# Altium footprint library FootPrintLib_12.PcbLib: 319 footprints (part 17 of 20)
Each footprint in its own frame and in the unit in brackets; x right, y up, seen from the top. Pads: shape width x height; smd on the part's side, far side on the other; paste and mask are expansions set on the pad; w line width, h text height; cw(c..) or ccw(c..) is an arc to the next point about the centre after c.
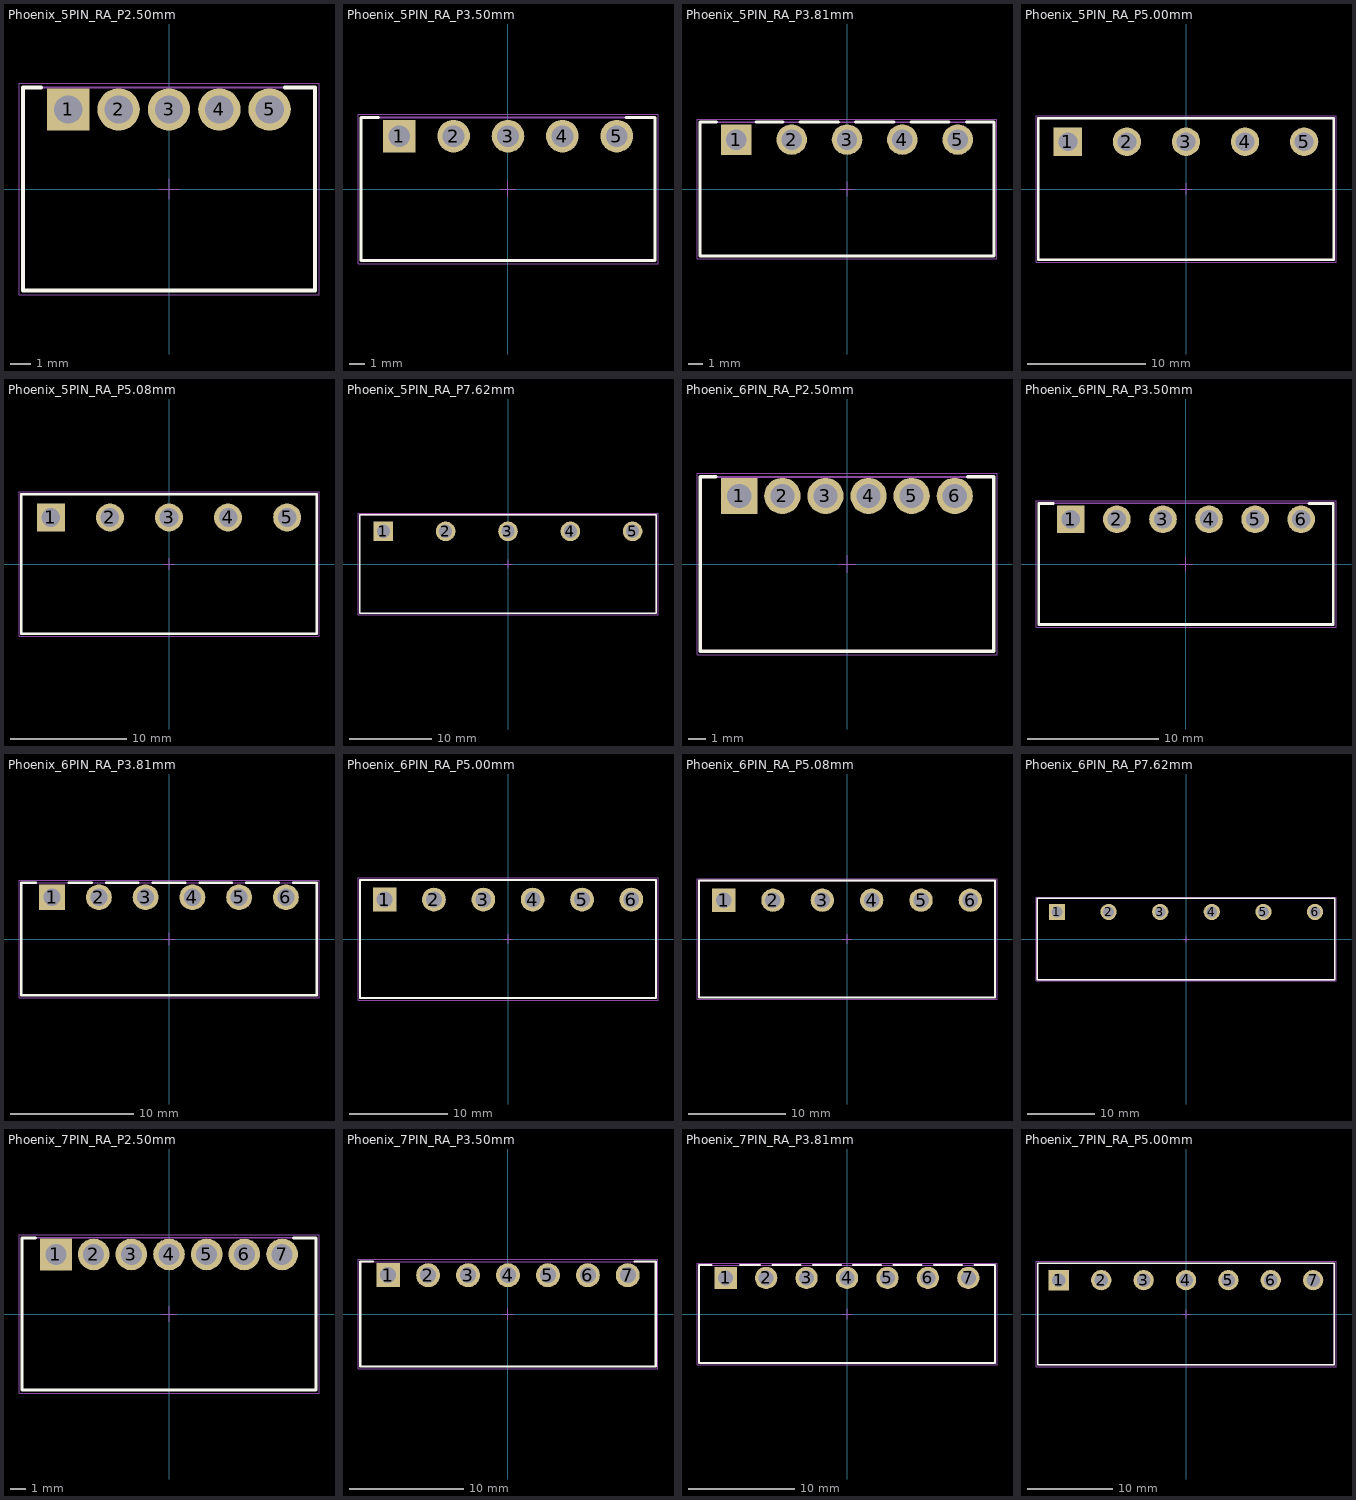
[diagram p16: the footprints below, top view; thin cyan lines are the x and y axes]

## Phoenix_5PIN_RA_P2.50mm [mm] "Phoenix 5 Pin; Pitch 2.50mm;"
height 8.1
pads (5):
  rect 2.1x2.1 hole 1.4: 1(-5,3.95)
  round 2.1 hole 1.4: 2(-2.5,3.95) 3(0,3.95) 4(2.5,3.95) 5(5,3.95)
Top Overlay:
  lines w0.2: -6.35,5.05 -7.25,5.05 -7.25,-5.05 7.25,-5.05 7.25,5.05 5.75,5.05
Mechanical 13:
  lines w0.1: -7.25,-5.05 7.25,-5.05 7.25,5.05 -7.25,5.05 -7.25,-5.05
Mechanical 15:
  lines w0.05: -0.5,0 0.5,0 ; 0,-0.5 0,0.5 ; -7.45,-5.25 7.45,-5.25 7.45,5.25 -7.45,5.25 -7.45,-5.25
3D body "691382010005.stp": height 8.15, standoff -3.45, extent -7.25,-5.05 7.25,5.05

## Phoenix_5PIN_RA_P3.50mm [mm] "Phoenix 5 Pin; Pitch 3.50mm;"
height 7
pads (5):
  rect 2.1x2.1 hole 1.4: 1(-7,3.4)
  round 2.1 hole 1.4: 2(-3.5,3.4) 3(0,3.4) 4(3.5,3.4) 5(7,3.4)
Top Overlay:
  lines w0.2: -8.35,4.6 -9.45,4.6 -9.45,-4.6 9.45,-4.6 9.45,4.6 7.6,4.6
Mechanical 13:
  lines w0.1: -9.45,-4.6 9.45,-4.6 9.45,4.6 -9.45,4.6 -9.45,-4.6
Mechanical 15:
  lines w0.05: -0.5,0 0.5,0 ; 0,-0.5 0,0.5 ; -9.65,-4.8 9.65,-4.8 9.65,4.8 -9.65,4.8 -9.65,-4.8
3D body "691322110005.stp": height 7.3, standoff -3.4, extent -9.45,-4.6 9.45,4.6

## Phoenix_5PIN_RA_P3.81mm [mm] "Phoenix 5 Pin; Pitch 3.81mm;"
height 7
pads (5):
  rect 2.1x2.1 hole 1.4: 1(-7.62,3.4)
  round 2.1 hole 1.4: 2(-3.81,3.4) 3(0,3.4) 4(3.81,3.4) 5(7.62,3.4)
Top Overlay:
  lines w0.2: -8.97,4.6 -10.12,4.6 -10.12,-4.6 10.12,-4.6 10.12,4.6 8.21,4.6 ; -6.27,4.6 -4.4,4.6 ; -3.22,4.6 -0.59,4.6 ; 0.59,4.6 3.22,4.6 ; 4.4,4.6 7.03,4.6
Mechanical 13:
  lines w0.1: -10.12,-4.6 10.12,-4.6 10.12,4.6 -10.12,4.6 -10.12,-4.6
Mechanical 15:
  lines w0.05: -0.5,0 0.5,0 ; 0,-0.5 0,0.5 ; -10.32,-4.8 10.32,-4.8 10.32,4.8 -10.32,4.8 -10.32,-4.8
3D body "691322310005.stp": height 7.25, standoff -3.45, extent -10.12,-4.6 10.12,4.6

## Phoenix_5PIN_RA_P5.00mm [mm] "Phoenix 5 Pin; Pitch 5.08mm;"
height 8.5
pads (5):
  rect 2.4x2.4 hole 1.6: 1(-10,4)
  round 2.4 hole 1.6: 2(-5,4) 3(0,4) 4(5,4) 5(10,4)
Top Overlay:
  lines w0.2: -12.5,-6 12.5,-6 12.5,6 -12.5,6 -12.5,-6
Mechanical 13:
  lines w0.1: -12.5,-6 -12.5,6 12.5,6 12.5,-6 -12.5,-6
Mechanical 15:
  lines w0.05: -0.5,0 0.5,0 ; 0,-0.5 0,0.5 ; -12.7,-6.2 12.7,-6.2 12.7,6.2 -12.7,6.2 -12.7,-6.2
3D body "691312710005.stp": height 8.55, standoff -3.45, extent -12.5,-6 12.5,6

## Phoenix_5PIN_RA_P5.08mm [mm] "Phoenix 5 Pin; Pitch 5.08mm; Body 2540X1200"
height 8.5
pads (5):
  rect 2.4x2.4 hole 1.6: 1(-10.16,4)
  round 2.4 hole 1.6: 2(-5.08,4) 3(0,4) 4(5.08,4) 5(10.16,4)
Top Overlay:
  lines w0.2: -12.7,-6 12.7,-6 12.7,6 -12.7,6 -12.7,-6
Mechanical 13:
  lines w0.1: -12.7,-6 -12.7,6 12.7,6 12.7,-6 -12.7,-6
Mechanical 15:
  lines w0.05: -0.5,0 0.5,0 ; 0,-0.5 0,0.5 ; -12.9,-6.2 12.9,-6.2 12.9,6.2 -12.9,6.2 -12.9,-6.2
3D body "691312510005.stp": height 8.55, standoff -3.45, extent -12.7,-6 12.7,6

## Phoenix_5PIN_RA_P7.62mm [mm] "Phoenix 5 Pin; Pitch 7.62mm;"
height 8.5
pads (5):
  rect 2.4x2.4 hole 1.6: 1(-15.24,4)
  round 2.4 hole 1.6: 2(-7.62,4) 3(0,4) 4(7.62,4) 5(15.24,4)
Top Overlay:
  lines w0.2: -18.14,-6 18.14,-6 18.14,6 -18.14,6 -18.14,-6
Mechanical 13:
  lines w0.1: -18.14,-6 -18.14,6 18.14,6 18.14,-6 -18.14,-6
Mechanical 15:
  lines w0.05: -0.5,0 0.5,0 ; 0,-0.5 0,0.5 ; -18.34,-6.2 -18.34,6.2 18.34,6.2 18.34,-6.2 -18.34,-6.2
3D body "691312410005.stp": height 8.55, standoff -3.95, extent -18.14,-6 18.14,6

## Phoenix_6PIN_RA_P2.50mm [mm] "Phoenix 6 Pin; Pitch 2.50mm;"
height 8.1
pads (6):
  rect 2.1x2.1 hole 1.4: 1(-6.25,3.95)
  round 2.1 hole 1.4: 2(-3.75,3.95) 3(-1.25,3.95) 4(1.25,3.95) 5(3.75,3.95) 6(6.25,3.95)
Top Overlay:
  lines w0.2: -7.6,5.05 -8.5,5.05 -8.5,-5.05 8.5,-5.05 8.5,5.05 7,5.05
Mechanical 13:
  lines w0.1: -8.5,-5.05 -8.5,5.05 8.5,5.05 8.5,-5.05 -8.5,-5.05
Mechanical 15:
  lines w0.05: -0.5,0 0.5,0 ; 0,-0.5 0,0.5 ; -8.7,-5.25 -8.7,5.25 8.7,5.25 8.7,-5.25 -8.7,-5.25
3D body "691382010006.stp": height 8.15, standoff -3.45, extent -8.5,-5.05 8.5,5.05

## Phoenix_6PIN_RA_P3.50mm [mm] "Phoenix 6 Pin; Pitch 3.50mm;"
height 7
pads (6):
  rect 2.1x2.1 hole 1.4: 1(-8.75,3.4)
  round 2.1 hole 1.4: 2(-5.25,3.4) 3(-1.75,3.4) 4(1.75,3.4) 5(5.25,3.4) 6(8.75,3.4)
Top Overlay:
  lines w0.2: -10.1,4.6 -11.2,4.6 -11.2,-4.6 11.2,-4.6 11.2,4.6 9.35,4.6
Mechanical 13:
  lines w0.1: -11.2,-4.6 -11.2,4.6 11.2,4.6 11.2,-4.6 -11.2,-4.6
Mechanical 15:
  lines w0.05: -0.5,0 0.5,0 ; 0,-0.5 0,0.5 ; -11.4,-4.8 -11.4,4.8 11.4,4.8 11.4,-4.8 -11.4,-4.8
3D body "691322110006.stp": height 7.3, standoff -3.4, extent -11.2,-4.6 11.2,4.6

## Phoenix_6PIN_RA_P3.81mm [mm] "Phoenix 6 Pin; Pitch 3.81mm;"
height 7
pads (6):
  rect 2.1x2.1 hole 1.4: 1(-9.525,3.4)
  round 2.1 hole 1.4: 2(-5.715,3.4) 3(-1.905,3.4) 4(1.905,3.4) 5(5.715,3.4) 6(9.525,3.4)
Top Overlay:
  lines w0.2: -10.875,4.6 -12.025,4.6 -12.025,-4.6 12.025,-4.6 12.025,4.6 10.115,4.6 ; -8.175,4.6 -6.305,4.6 ; -5.125,4.6 -2.495,4.6 ; -1.315,4.6 1.315,4.6 ; 2.495,4.6 5.125,4.6 ; 6.305,4.6 8.935,4.6
Mechanical 13:
  lines w0.1: -12.025,-4.6 12.025,-4.6 12.025,4.6 -12.025,4.6 -12.025,-4.6
Mechanical 15:
  lines w0.05: -0.5,0 0.5,0 ; 0,-0.5 0,0.5 ; -12.225,-4.8 12.225,-4.8 12.225,4.8 -12.225,4.8 -12.225,-4.8
3D body "691322310006.stp": height 7.25, standoff -3.45, extent -12.025,-4.6 12.025,4.6

## Phoenix_6PIN_RA_P5.00mm [mm] "Phoenix 6 Pin; Pitch 5.08mm; Body 3048X1200"
height 8.5
pads (6):
  rect 2.4x2.4 hole 1.6: 1(-12.5,4)
  round 2.4 hole 1.6: 2(-7.5,4) 3(-2.5,4) 4(2.5,4) 5(7.5,4) 6(12.5,4)
Top Overlay:
  lines w0.2: -15,-6 -15,6 15,6 15,-6 -15,-6
Mechanical 13:
  lines w0.1: -15,-6 15,-6 15,6 -15,6 -15,-6
Mechanical 15:
  lines w0.05: -0.5,0 0.5,0 ; 0,-0.5 0,0.5 ; -15.2,-6.2 -15.2,6.2 15.2,6.2 15.2,-6.2 -15.2,-6.2
3D body "691312710006.stp": height 8.55, standoff -3.45, extent -15,-6 15,6

## Phoenix_6PIN_RA_P5.08mm [mm] "Phoenix 6 Pin; Pitch 5.08mm; Body 3048X1200"
height 8.5
pads (6):
  rect 2.4x2.4 hole 1.6: 1(-12.7,4)
  round 2.4 hole 1.6: 2(-7.62,4) 3(-2.54,4) 4(2.54,4) 5(7.62,4) 6(12.7,4)
Top Overlay:
  lines w0.2: -15.24,-6 -15.24,6 15.24,6 15.24,-6 -15.24,-6
Mechanical 13:
  lines w0.1: -15.24,-6 15.24,-6 15.24,6 -15.24,6 -15.24,-6
Mechanical 15:
  lines w0.05: -0.5,0 0.5,0 ; 0,-0.5 0,0.5 ; -15.44,-6.2 -15.44,6.2 15.44,6.2 15.44,-6.2 -15.44,-6.2
3D body "691312510006.stp": height 8.55, standoff -3.45, extent -15.24,-6 15.24,6

## Phoenix_6PIN_RA_P7.62mm [mm] "Phoenix 6 Pin; Pitch 7.62mm;"
height 8.5
pads (6):
  rect 2.4x2.4 hole 1.6: 1(-19.05,4)
  round 2.4 hole 1.6: 2(-11.43,4) 3(-3.81,4) 4(3.81,4) 5(11.43,4) 6(19.05,4)
Top Overlay:
  lines w0.2: -21.95,-6 21.95,-6 21.95,6 -21.95,6 -21.95,-6
Mechanical 13:
  lines w0.1: -21.95,-6 -21.95,6 21.95,6 21.95,-6 -21.95,-6
Mechanical 15:
  lines w0.05: -0.5,0 0.5,0 ; 0,-0.5 0,0.5 ; -22.15,-6.2 -22.15,6.2 22.15,6.2 22.15,-6.2 -22.15,-6.2
3D body "691312410006.stp": height 8.55, standoff -3.95, extent -21.95,-6 21.95,6

## Phoenix_7PIN_RA_P2.50mm [mm] "Phoenix 7 Pin; Pitch 2.50mm;"
height 8.1
pads (7):
  rect 2.1x2.1 hole 1.4: 1(-7.5,3.95)
  round 2.1 hole 1.4: 2(-5,3.95) 3(-2.5,3.95) 4(0,3.95) 5(2.5,3.95) 6(5,3.95) 7(7.5,3.95)
Top Overlay:
  lines w0.2: -8.85,5.05 -9.75,5.05 -9.75,-5.05 9.75,-5.05 9.75,5.05 8.25,5.05
Mechanical 13:
  lines w0.1: -9.75,-5.05 -9.75,5.05 9.75,5.05 9.75,-5.05 -9.75,-5.05
Mechanical 15:
  lines w0.05: -0.5,0 0.5,0 ; 0,-0.5 0,0.5 ; -9.95,-5.25 -9.95,5.25 9.95,5.25 9.95,-5.25 -9.95,-5.25
3D body "691382010007.stp": height 8.15, standoff -3.45, extent -9.75,-5.05 9.75,5.05

## Phoenix_7PIN_RA_P3.50mm [mm] "Phoenix 7 Pin; Pitch 3.50mm;"
height 7
pads (7):
  rect 2.1x2.1 hole 1.4: 1(-10.5,3.4)
  round 2.1 hole 1.4: 2(-7,3.4) 3(-3.5,3.4) 4(0,3.4) 5(3.5,3.4) 6(7,3.4) 7(10.5,3.4)
Top Overlay:
  lines w0.2: -11.85,4.6 -12.95,4.6 -12.95,-4.6 12.95,-4.6 12.95,4.6 11.1,4.6
Mechanical 13:
  lines w0.1: -12.95,-4.6 12.95,-4.6 12.95,4.6 -12.95,4.6 -12.95,-4.6
Mechanical 15:
  lines w0.05: -0.5,0 0.5,0 ; 0,-0.5 0,0.5 ; -13.15,-4.8 13.15,-4.8 13.15,4.8 -13.15,4.8 -13.15,-4.8
3D body "691322110007.stp": height 7.3, standoff -3.4, extent -12.95,-4.6 12.95,4.6

## Phoenix_7PIN_RA_P3.81mm [mm] "Phoenix 7 Pin; Pitch 3.81mm;"
height 7
pads (7):
  rect 2.1x2.1 hole 1.4: 1(-11.43,3.4)
  round 2.1 hole 1.4: 2(-7.62,3.4) 3(-3.81,3.4) 4(0,3.4) 5(3.81,3.4) 6(7.62,3.4) 7(11.43,3.4)
Top Overlay:
  lines w0.2: -12.78,4.6 -13.93,4.6 -13.93,-4.6 13.93,-4.6 13.93,4.6 12.02,4.6 ; -10.08,4.6 -8.21,4.6 ; -7.03,4.6 -4.4,4.6 ; -3.22,4.6 -0.59,4.6 ; 0.59,4.6 3.22,4.6 ; 4.4,4.6 7.03,4.6 ; 8.21,4.6 10.84,4.6
Mechanical 13:
  lines w0.1: -13.93,-4.6 -13.93,4.6 13.93,4.6 13.93,-4.6 -13.93,-4.6
Mechanical 15:
  lines w0.05: -0.5,0 0.5,0 ; 0,-0.5 0,0.5 ; -14.13,-4.8 -14.13,4.8 14.13,4.8 14.13,-4.8 -14.13,-4.8
3D body "691322310007.stp": height 7.25, standoff -3.45, extent -13.93,-4.6 13.93,4.6

## Phoenix_7PIN_RA_P5.00mm [mm] "Phoenix 7 Pin; Pitch 5.08mm;"
height 8.5
pads (7):
  rect 2.4x2.4 hole 1.6: 1(-15,4)
  round 2.4 hole 1.6: 2(-10,4) 3(-5,4) 4(0,4) 5(5,4) 6(10,4) 7(15,4)
Top Overlay:
  lines w0.2: -17.5,-6 17.5,-6 17.5,6 -17.5,6 -17.5,-6
Mechanical 13:
  lines w0.1: -17.5,-6 -17.5,6 17.5,6 17.5,-6 -17.5,-6
Mechanical 15:
  lines w0.05: -0.5,0 0.5,0 ; 0,-0.5 0,0.5 ; -17.7,-6.2 17.7,-6.2 17.7,6.2 -17.7,6.2 -17.7,-6.2
3D body "691312710007.stp": height 8.55, standoff -3.45, extent -17.5,-6 17.5,6